# Altium footprint library WR-TBL_Pluggable Connector_3.50mm.PcbLib: 175 footprints (part 7 of 11)
Each footprint in its own frame and in the unit in brackets; x right, y up, seen from the top. Pads: shape width x height; smd on the part's side, far side on the other; paste and mask are expansions set on the pad; w line width, h text height; cw(c..) or ccw(c..) is an arc to the next point about the centre after c.
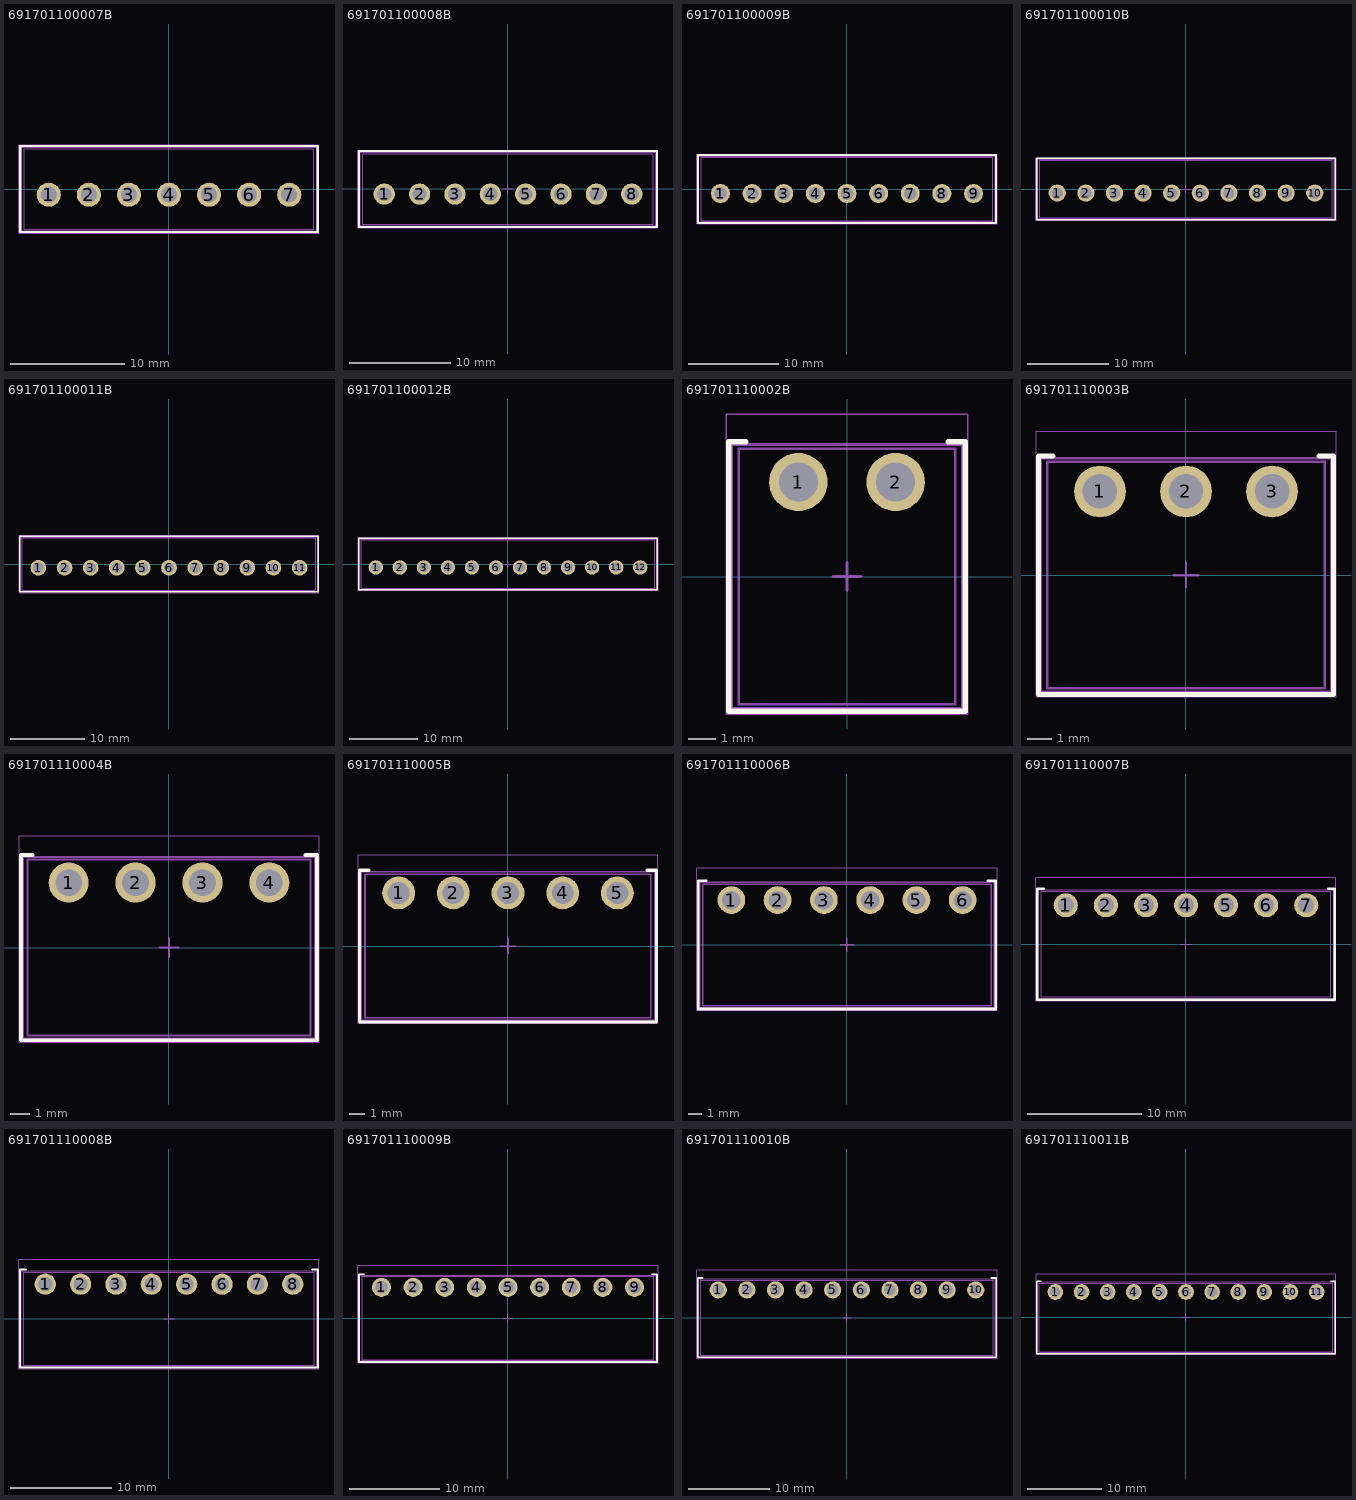
[diagram p6: the footprints below, top view; thin cyan lines are the x and y axes]

## 691701100007B [mm] "3.50 mm Vertical PCB Header THR type, 07p"
height 9.2
pads (7):
  round 2.1 hole 1.4: 1(-10.5,-0.5) 2(-7,-0.5) 3(-3.5,-0.5) 4(0,-0.5) 5(3.5,-0.5) 6(7,-0.5) 7(10.5,-0.5)
Top Overlay:
  lines w0.2: -13,-3.75 13,-3.75 13,3.75 -13,3.75 -13,-3.75
Top Paste:
  region: 5.05,1.75 5.05,-2.75 1.95,-2.75 1.95,1.75
  region: 1.55,1.75 1.55,-2.75 -1.55,-2.75 -1.55,1.75
  region: -1.95,1.75 -1.95,-2.75 -5.05,-2.75 -5.05,1.75
  region: -5.45,1.75 -5.45,-2.75 -8.55,-2.75 -8.55,1.75
  region: -8.95,1.75 -8.95,-2.75 -12.05,-2.75 -12.05,1.75
  region: 8.55,1.75 8.55,-2.75 5.45,-2.75 5.45,1.75
  region: 12.05,1.75 12.05,-2.75 8.95,-2.75 8.95,1.75
Assembly Notes:
  text "Stencil thickness : 120 μm" at -5.156,-4.601 h1
Top Assembly:
  lines w0.1: -12.9,-3.65 12.9,-3.65 12.9,3.65 -12.9,3.65 -12.9,-3.65
Top Designator:
  text ".Designator" at -3.647,-0.357 h1
Top 3D Body:
  lines w0.1: -12.65,-3.5 12.65,-3.5 12.65,3.5 -12.65,3.5 -12.65,-3.5
Top Courtyard:
  lines w0.05: -13.1,-3.85 -13.1,3.85 13.1,3.85 13.1,-3.85 -13.1,-3.85
Top Component Center:
  lines w0.1: -0.5,0 0.5,0 ; 0,-0.5 0,0.5
3D body "691701100007B.stp": height 9.25, standoff -2.55, extent -12.85,-3.5 12.85,3.5

## 691701100008B [mm] "3.50 mm Vertical PCB Header THR type, 08p"
height 9.2
pads (8):
  round 2.1 hole 1.4: 1(-12.25,-0.5) 2(-8.75,-0.5) 3(-5.25,-0.5) 4(-1.75,-0.5) 5(1.75,-0.5) 6(5.25,-0.5) 7(8.75,-0.5) 8(12.25,-0.5)
Top Overlay:
  lines w0.2: -14.75,-3.75 14.75,-3.75 14.75,3.75 -14.75,3.75 -14.75,-3.75
Top Paste:
  region: 13.8,1.75 13.8,-2.75 10.7,-2.75 10.7,1.75
  region: 10.3,1.75 10.3,-2.75 7.2,-2.75 7.2,1.75
  region: 6.8,1.75 6.8,-2.75 3.7,-2.75 3.7,1.75
  region: -10.7,1.75 -10.7,-2.75 -13.8,-2.75 -13.8,1.75
  region: -7.2,1.75 -7.2,-2.75 -10.3,-2.75 -10.3,1.75
  region: -3.7,1.75 -3.7,-2.75 -6.8,-2.75 -6.8,1.75
  region: -0.2,1.75 -0.2,-2.75 -3.3,-2.75 -3.3,1.75
  region: 3.3,1.75 3.3,-2.75 0.2,-2.75 0.2,1.75
Assembly Notes:
  text "Stencil thickness : 120 μm" at -5.156,-4.601 h1
Top Assembly:
  lines w0.1: -14.65,-3.65 14.65,-3.65 14.65,3.65 -14.65,3.65 -14.65,-3.65
Top Designator:
  text ".Designator" at -3.647,-0.357 h1
Top 3D Body:
  lines w0.1: -14.4,-3.5 14.4,-3.5 14.4,3.5 -14.4,3.5 -14.4,-3.5
Top Courtyard:
  lines w0.05: -14.85,-3.85 -14.85,3.85 14.85,3.85 14.85,-3.85 -14.85,-3.85
Top Component Center:
  lines w0.1: -0.5,0 0.5,0 ; 0,-0.5 0,0.5
3D body "691701100008B.stp": height 9.25, standoff -2.55, extent -14.6,-3.5 14.6,3.5

## 691701100009B [mm] "3.50 mm Vertical PCB Header THR type, 09p"
height 9.2
pads (9):
  round 2.1 hole 1.4: 1(-14,-0.5) 2(-10.5,-0.5) 3(-7,-0.5) 4(-3.5,-0.5) 5(0,-0.5) 6(3.5,-0.5) 7(7,-0.5) 8(10.5,-0.5) 9(14,-0.5)
Top Overlay:
  lines w0.2: -16.5,-3.75 16.5,-3.75 16.5,3.75 -16.5,3.75 -16.5,-3.75
Top Paste:
  region: 15.55,1.75 15.55,-2.75 12.45,-2.75 12.45,1.75
  region: 12.05,1.75 12.05,-2.75 8.95,-2.75 8.95,1.75
  region: 8.55,1.75 8.55,-2.75 5.45,-2.75 5.45,1.75
  region: 5.05,1.75 5.05,-2.75 1.95,-2.75 1.95,1.75
  region: -12.45,1.75 -12.45,-2.75 -15.55,-2.75 -15.55,1.75
  region: -8.95,1.75 -8.95,-2.75 -12.05,-2.75 -12.05,1.75
  region: -5.45,1.75 -5.45,-2.75 -8.55,-2.75 -8.55,1.75
  region: -1.95,1.75 -1.95,-2.75 -5.05,-2.75 -5.05,1.75
  region: 1.55,1.75 1.55,-2.75 -1.55,-2.75 -1.55,1.75
Assembly Notes:
  text "Stencil thickness : 120 μm" at -5.156,-4.601 h1
Top Assembly:
  lines w0.1: -16.4,-3.65 16.4,-3.65 16.4,3.65 -16.4,3.65 -16.4,-3.65
Top Designator:
  text ".Designator" at -3.647,-0.357 h1
Top 3D Body:
  lines w0.1: -16.15,-3.5 -16.15,3.5 16.15,3.5 16.15,-3.5 -16.15,-3.5
Top Courtyard:
  lines w0.05: -16.6,-3.85 -16.6,3.85 16.6,3.85 16.6,-3.85 -16.6,-3.85
Top Component Center:
  lines w0.1: -0.5,0 0.5,0 ; 0,-0.5 0,0.5
3D body "691701100009B.stp": height 9.25, standoff -2.55, extent -16.35,-3.5 16.35,3.5

## 691701100010B [mm] "3.50 mm Vertical PCB Header THR type, 10p"
height 9.2
pads (10):
  round 2.1 hole 1.4: 1(-15.75,-0.5) 2(-12.25,-0.5) 3(-8.75,-0.5) 4(-5.25,-0.5) 5(-1.75,-0.5) 6(1.75,-0.5) 7(5.25,-0.5) 8(8.75,-0.5) 9(12.25,-0.5) 10(15.75,-0.5)
Top Overlay:
  lines w0.2: -18.25,-3.75 -18.25,3.75 18.25,3.75 18.25,-3.75 -18.25,-3.75
Top Paste:
  region: 13.8,1.75 13.8,-2.75 10.7,-2.75 10.7,1.75
  region: 10.3,1.75 10.3,-2.75 7.2,-2.75 7.2,1.75
  region: 6.8,1.75 6.8,-2.75 3.7,-2.75 3.7,1.75
  region: 3.3,1.75 3.3,-2.75 0.2,-2.75 0.2,1.75
  region: -14.2,1.75 -14.2,-2.75 -17.3,-2.75 -17.3,1.75
  region: -10.7,1.75 -10.7,-2.75 -13.8,-2.75 -13.8,1.75
  region: -7.2,1.75 -7.2,-2.75 -10.3,-2.75 -10.3,1.75
  region: -3.7,1.75 -3.7,-2.75 -6.8,-2.75 -6.8,1.75
  region: -0.2,1.75 -0.2,-2.75 -3.3,-2.75 -3.3,1.75
  region: 17.3,1.75 17.3,-2.75 14.2,-2.75 14.2,1.75
Assembly Notes:
  text "Stencil thickness : 120 μm" at -5.156,-4.601 h1
Top Assembly:
  lines w0.1: -18.15,-3.65 -18.15,3.65 18.15,3.65 18.15,-3.65 -18.15,-3.65
Top Designator:
  text ".Designator" at -3.647,-0.357 h1
Top 3D Body:
  lines w0.1: -17.9,-3.5 17.9,-3.5 17.9,3.5 -17.9,3.5 -17.9,-3.5
Top Courtyard:
  lines w0.05: -18.35,-3.85 18.35,-3.85 18.35,3.85 -18.35,3.85 -18.35,-3.85
Top Component Center:
  lines w0.1: -0.5,0 0.5,0 ; 0,-0.5 0,0.5
3D body "691701100010B.stp": height 9.25, standoff -2.55, extent -18.1,-3.5 18.1,3.5

## 691701100011B [mm] "3.50 mm Vertical PCB Header THR type, 11p"
height 9.2
pads (11):
  round 2.1 hole 1.4: 1(-17.5,-0.5) 2(-14,-0.5) 3(-10.5,-0.5) 4(-7,-0.5) 5(-3.5,-0.5) 6(0,-0.5) 7(3.5,-0.5) 8(7,-0.5) 9(10.5,-0.5) 10(14,-0.5) 11(17.5,-0.5)
Top Overlay:
  lines w0.2: -20,-3.75 20,-3.75 20,3.75 -20,3.75 -20,-3.75
Top Paste:
  region: 15.55,1.75 15.55,-2.75 12.45,-2.75 12.45,1.75
  region: -1.95,1.75 -1.95,-2.75 -5.05,-2.75 -5.05,1.75
  region: -5.45,1.75 -5.45,-2.75 -8.55,-2.75 -8.55,1.75
  region: -8.95,1.75 -8.95,-2.75 -12.05,-2.75 -12.05,1.75
  region: -12.45,1.75 -12.45,-2.75 -15.55,-2.75 -15.55,1.75
  region: -15.95,1.75 -15.95,-2.75 -19.05,-2.75 -19.05,1.75
  region: 1.55,1.75 1.55,-2.75 -1.55,-2.75 -1.55,1.75
  region: 5.05,1.75 5.05,-2.75 1.95,-2.75 1.95,1.75
  region: 8.55,1.75 8.55,-2.75 5.45,-2.75 5.45,1.75
  region: 12.05,1.75 12.05,-2.75 8.95,-2.75 8.95,1.75
  region: 19.05,1.75 19.05,-2.75 15.95,-2.75 15.95,1.75
Assembly Notes:
  text "Stencil thickness : 120 μm" at -5.156,-4.601 h1
Top Assembly:
  lines w0.1: -19.9,-3.65 19.9,-3.65 19.9,3.65 -19.9,3.65 -19.9,-3.65
Top Designator:
  text ".Designator" at -3.647,-0.357 h1
Top 3D Body:
  lines w0.1: -19.65,-3.5 -19.65,3.5 19.65,3.5 19.65,-3.5 -19.65,-3.5
Top Courtyard:
  lines w0.05: -20.1,-3.85 -20.1,3.85 20.1,3.85 20.1,-3.85 -20.1,-3.85
Top Component Center:
  lines w0.1: -0.5,0 0.5,0 ; 0,-0.5 0,0.5
3D body "691701100011B.stp": height 9.25, standoff -2.55, extent -19.85,-3.5 19.85,3.5

## 691701100012B [mm] "3.50 mm Vertical PCB Header THR type, 12p"
height 9.2
pads (12):
  round 2.1 hole 1.4: 1(-19.25,-0.5) 2(-15.75,-0.5) 3(-12.25,-0.5) 4(-8.75,-0.5) 5(-5.25,-0.5) 6(-1.75,-0.5) 7(1.75,-0.5) 8(5.25,-0.5) 9(8.75,-0.5) 10(12.25,-0.5) 11(15.75,-0.5) 12(19.25,-0.5)
Top Overlay:
  lines w0.2: -21.75,-3.75 21.75,-3.75 21.75,3.75 -21.75,3.75 -21.75,-3.75
Top Paste:
  region: 20.8,1.75 20.8,-2.75 17.7,-2.75 17.7,1.75
  region: 17.3,1.75 17.3,-2.75 14.2,-2.75 14.2,1.75
  region: 10.3,1.75 10.3,-2.75 7.2,-2.75 7.2,1.75
  region: 6.8,1.75 6.8,-2.75 3.7,-2.75 3.7,1.75
  region: 3.3,1.75 3.3,-2.75 0.2,-2.75 0.2,1.75
  region: -0.2,1.75 -0.2,-2.75 -3.3,-2.75 -3.3,1.75
  region: -17.7,1.75 -17.7,-2.75 -20.8,-2.75 -20.8,1.75
  region: -14.2,1.75 -14.2,-2.75 -17.3,-2.75 -17.3,1.75
  region: -10.7,1.75 -10.7,-2.75 -13.8,-2.75 -13.8,1.75
  region: -7.2,1.75 -7.2,-2.75 -10.3,-2.75 -10.3,1.75
  region: -3.7,1.75 -3.7,-2.75 -6.8,-2.75 -6.8,1.75
  region: 13.8,1.75 13.8,-2.75 10.7,-2.75 10.7,1.75
Assembly Notes:
  text "Stencil thickness : 120 μm" at -5.156,-4.601 h1
Top Assembly:
  lines w0.1: -21.65,-3.65 21.65,-3.65 21.65,3.65 -21.65,3.65 -21.65,-3.65
Top Designator:
  text ".Designator" at -3.647,-0.357 h1
Top 3D Body:
  lines w0.1: -21.4,-3.5 -21.4,3.5 21.4,3.5 21.4,-3.5 -21.4,-3.5
Top Courtyard:
  lines w0.05: -21.85,-3.85 -21.85,3.85 21.85,3.85 21.85,-3.85 -21.85,-3.85
Top Component Center:
  lines w0.1: -0.5,0 0.5,0 ; 0,-0.5 0,0.5
3D body "691701100012B.stp": height 9.25, standoff -2.55, extent -21.6,-3.5 21.6,3.5

## 691701110002B [mm] "3.50 mm Horizontal PCB Header THR type, 02p"
height 7
pads (2):
  round 2.1 hole 1.4: 1(-1.75,3.4) 2(1.75,3.4)
Top Overlay:
  lines w0.2: -3.65,4.85 -4.25,4.85 -4.25,-4.85 4.25,-4.85 4.25,4.85 3.65,4.85
Top Paste:
  region: 0.2,5.65 3.3,5.65 3.3,1.15 0.2,1.15
  region: -3.3,5.65 -0.2,5.65 -0.2,1.15 -3.3,1.15
Assembly Notes:
  text "Stencil thickness : 120 μm" at -5.156,-5.651 h1
Top Assembly:
  lines w0.1: -4.15,-4.75 -4.15,4.75 4.15,4.75 4.15,-4.75 -4.15,-4.75
Top Designator:
  text ".Designator" at -3.647,-0.357 h1
Top 3D Body:
  lines w0.1: -3.9,-4.6 3.9,-4.6 3.9,4.6 -3.9,4.6 -3.9,-4.6
Top Courtyard:
  lines w0.05: -4.35,-4.95 4.35,-4.95 4.35,5.85 -4.35,5.85 -4.35,-4.95
Top Component Center:
  lines w0.1: -0.5,0 0.5,0 ; 0,-0.5 0,0.5
3D body "691701110002B.stp": height 7.05, standoff -2.55, extent -4.1,-4.6 4.1,4.6

## 691701110003B [mm] "3.50 mm Horizontal PCB Header THR type, 03p"
height 7
pads (3):
  round 2.1 hole 1.4: 1(-3.5,3.4) 2(0,3.4) 3(3.5,3.4)
Top Overlay:
  lines w0.2: -5.4,4.85 -6,4.85 -6,-4.85 6,-4.85 6,4.85 5.4,4.85
Top Paste:
  region: -1.55,5.65 1.55,5.65 1.55,1.15 -1.55,1.15
  region: -5.05,5.65 -1.95,5.65 -1.95,1.15 -5.05,1.15
  region: 1.95,5.65 5.05,5.65 5.05,1.15 1.95,1.15
Assembly Notes:
  text "Stencil thickness : 120 μm" at -5.156,-5.651 h1
Top Assembly:
  lines w0.1: -5.9,-4.75 5.9,-4.75 5.9,4.75 -5.9,4.75 -5.9,-4.75
Top Designator:
  text ".Designator" at -3.647,-0.357 h1
Top 3D Body:
  lines w0.1: -5.65,-4.6 -5.65,4.6 5.65,4.6 5.65,-4.6 -5.65,-4.6
Top Courtyard:
  lines w0.05: -6.1,-4.95 -6.1,5.85 6.1,5.85 6.1,-4.95 -6.1,-4.95
Top Component Center:
  lines w0.1: -0.5,0 0.5,0 ; 0,-0.5 0,0.5
3D body "691701110003B.stp": height 7.05, standoff -2.55, extent -5.85,-4.6 5.85,4.6

## 691701110004B [mm] "3.50 mm Horizontal PCB Header THR type, 04p"
height 7
pads (4):
  round 2.1 hole 1.4: 1(-5.25,3.4) 2(-1.75,3.4) 3(1.75,3.4) 4(5.25,3.4)
Top Overlay:
  lines w0.2: -7.15,4.85 -7.75,4.85 -7.75,-4.85 7.75,-4.85 7.75,4.85 7.15,4.85
Top Paste:
  region: 0.2,5.65 3.3,5.65 3.3,1.15 0.2,1.15
  region: -6.8,5.65 -3.7,5.65 -3.7,1.15 -6.8,1.15
  region: -3.3,5.65 -0.2,5.65 -0.2,1.15 -3.3,1.15
  region: 3.7,5.65 6.8,5.65 6.8,1.15 3.7,1.15
Assembly Notes:
  text "Stencil thickness : 120 μm" at -5.156,-5.651 h1
Top Assembly:
  lines w0.1: -7.65,-4.75 7.65,-4.75 7.65,4.75 -7.65,4.75 -7.65,-4.75
Top Designator:
  text ".Designator" at -3.647,-0.357 h1
Top 3D Body:
  lines w0.1: -7.4,-4.6 -7.4,4.6 7.4,4.6 7.4,-4.6 -7.4,-4.6
Top Courtyard:
  lines w0.05: -7.85,-4.95 -7.85,5.85 7.85,5.85 7.85,-4.95 -7.85,-4.95
Top Component Center:
  lines w0.1: -0.5,0 0.5,0 ; 0,-0.5 0,0.5
3D body "691701110004B.stp": height 7.05, standoff -2.55, extent -7.6,-4.6 7.6,4.6

## 691701110005B [mm] "3.50 mm Horizontal PCB Header THR type, 05p"
height 7
pads (5):
  round 2.1 hole 1.4: 1(-7,3.4) 2(-3.5,3.4) 3(0,3.4) 4(3.5,3.4) 5(7,3.4)
Top Overlay:
  lines w0.2: -8.9,4.85 -9.5,4.85 -9.5,-4.85 9.5,-4.85 9.5,4.85 8.9,4.85
Top Paste:
  region: 5.45,5.65 8.55,5.65 8.55,1.15 5.45,1.15
  region: 1.95,5.65 5.05,5.65 5.05,1.15 1.95,1.15
  region: -5.05,5.65 -1.95,5.65 -1.95,1.15 -5.05,1.15
  region: -8.55,5.65 -5.45,5.65 -5.45,1.15 -8.55,1.15
  region: -1.55,5.65 1.55,5.65 1.55,1.15 -1.55,1.15
Assembly Notes:
  text "Stencil thickness : 120 μm" at -5.156,-5.651 h1
Top Assembly:
  lines w0.1: -9.4,-4.75 9.4,-4.75 9.4,4.75 -9.4,4.75 -9.4,-4.75
Top Designator:
  text ".Designator" at -3.647,-0.357 h1
Top 3D Body:
  lines w0.1: -9.15,-4.6 -9.15,4.6 9.15,4.6 9.15,-4.6 -9.15,-4.6
Top Courtyard:
  lines w0.05: -9.6,-4.95 -9.6,5.85 9.6,5.85 9.6,-4.95 -9.6,-4.95
Top Component Center:
  lines w0.1: -0.5,0 0.5,0 ; 0,-0.5 0,0.5
3D body "691701110005B.stp": height 7.05, standoff -2.55, extent -9.35,-4.6 9.35,4.6

## 691701110006B [mm] "3.50 mm Horizontal PCB Header THR type, 06p"
height 7
pads (6):
  round 2.1 hole 1.4: 1(-8.75,3.4) 2(-5.25,3.4) 3(-1.75,3.4) 4(1.75,3.4) 5(5.25,3.4) 6(8.75,3.4)
Top Overlay:
  lines w0.2: -10.65,4.85 -11.25,4.85 -11.25,-4.85 11.25,-4.85 11.25,4.85 10.65,4.85
Top Paste:
  region: -3.3,5.65 -0.2,5.65 -0.2,1.15 -3.3,1.15
  region: -10.3,5.65 -7.2,5.65 -7.2,1.15 -10.3,1.15
  region: -6.8,5.65 -3.7,5.65 -3.7,1.15 -6.8,1.15
  region: 0.2,5.65 3.3,5.65 3.3,1.15 0.2,1.15
  region: 3.7,5.65 6.8,5.65 6.8,1.15 3.7,1.15
  region: 7.2,5.65 10.3,5.65 10.3,1.15 7.2,1.15
Assembly Notes:
  text "Stencil thickness : 120 μm" at -5.156,-5.651 h1
Top Assembly:
  lines w0.1: -11.15,-4.75 11.15,-4.75 11.15,4.75 -11.15,4.75 -11.15,-4.75
Top Designator:
  text ".Designator" at -3.647,-0.357 h1
Top 3D Body:
  lines w0.1: -10.9,-4.6 -10.9,4.6 10.9,4.6 10.9,-4.6 -10.9,-4.6
Top Courtyard:
  lines w0.05: -11.35,-4.95 -11.35,5.85 11.35,5.85 11.35,-4.95 -11.35,-4.95
Top Component Center:
  lines w0.1: -0.5,0 0.5,0 ; 0,-0.5 0,0.5
3D body "691701110006B.stp": height 7.05, standoff -2.55, extent -11.1,-4.6 11.1,4.6

## 691701110007B [mm] "3.50 mm Horizontal PCB Header THR type, 07p"
height 7
pads (7):
  round 2.1 hole 1.4: 1(-10.5,3.4) 2(-7,3.4) 3(-3.5,3.4) 4(0,3.4) 5(3.5,3.4) 6(7,3.4) 7(10.5,3.4)
Top Overlay:
  lines w0.2: -12.4,4.85 -13,4.85 -13,-4.85 13,-4.85 13,4.85 12.4,4.85
Top Paste:
  region: -5.05,5.65 -1.95,5.65 -1.95,1.15 -5.05,1.15
  region: -12.05,5.65 -8.95,5.65 -8.95,1.15 -12.05,1.15
  region: -8.55,5.65 -5.45,5.65 -5.45,1.15 -8.55,1.15
  region: -1.55,5.65 1.55,5.65 1.55,1.15 -1.55,1.15
  region: 1.95,5.65 5.05,5.65 5.05,1.15 1.95,1.15
  region: 5.45,5.65 8.55,5.65 8.55,1.15 5.45,1.15
  region: 8.95,5.65 12.05,5.65 12.05,1.15 8.95,1.15
Assembly Notes:
  text "Stencil thickness : 120 μm" at -5.156,-5.651 h1
Top Assembly:
  lines w0.1: -12.9,-4.75 -12.9,4.75 12.9,4.75 12.9,-4.75 -12.9,-4.75
Top Designator:
  text ".Designator" at -3.647,-0.357 h1
Top 3D Body:
  lines w0.1: -12.65,-4.6 12.65,-4.6 12.65,4.6 -12.65,4.6 -12.65,-4.6
Top Courtyard:
  lines w0.05: -13.1,-4.95 13.1,-4.95 13.1,5.85 -13.1,5.85 -13.1,-4.95
Top Component Center:
  lines w0.1: -0.5,0 0.5,0 ; 0,-0.5 0,0.5
3D body "691701110007B.stp": height 7.05, standoff -2.55, extent -12.85,-4.6 12.85,4.6

## 691701110008B [mm] "3.50 mm Horizontal PCB Header THR type, 08p"
height 7
pads (8):
  round 2.1 hole 1.4: 1(-12.25,3.4) 2(-8.75,3.4) 3(-5.25,3.4) 4(-1.75,3.4) 5(1.75,3.4) 6(5.25,3.4) 7(8.75,3.4) 8(12.25,3.4)
Top Overlay:
  lines w0.2: -14.15,4.85 -14.75,4.85 -14.75,-4.85 14.75,-4.85 14.75,4.85 14.15,4.85
Top Paste:
  region: -6.8,5.65 -3.7,5.65 -3.7,1.15 -6.8,1.15
  region: -13.8,5.65 -10.7,5.65 -10.7,1.15 -13.8,1.15
  region: -10.3,5.65 -7.2,5.65 -7.2,1.15 -10.3,1.15
  region: -3.3,5.65 -0.2,5.65 -0.2,1.15 -3.3,1.15
  region: 0.2,5.65 3.3,5.65 3.3,1.15 0.2,1.15
  region: 3.7,5.65 6.8,5.65 6.8,1.15 3.7,1.15
  region: 7.2,5.65 10.3,5.65 10.3,1.15 7.2,1.15
  region: 10.7,5.65 13.8,5.65 13.8,1.15 10.7,1.15
Assembly Notes:
  text "Stencil thickness : 120 μm" at -5.156,-5.651 h1
Top Assembly:
  lines w0.1: -14.65,-4.75 14.65,-4.75 14.65,4.75 -14.65,4.75 -14.65,-4.75
Top Designator:
  text ".Designator" at -3.647,-0.357 h1
Top 3D Body:
  lines w0.1: -14.4,-4.6 -14.4,4.6 14.4,4.6 14.4,-4.6 -14.4,-4.6
Top Courtyard:
  lines w0.05: -14.85,-4.95 -14.85,5.85 14.85,5.85 14.85,-4.95 -14.85,-4.95
Top Component Center:
  lines w0.1: -0.5,0 0.5,0 ; 0,-0.5 0,0.5
3D body "691701110008B.stp": height 7.05, standoff -2.55, extent -14.6,-4.6 14.6,4.6

## 691701110009B [mm] "3.50 mm Horizontal PCB Header THR type, 09p"
height 7
pads (9):
  round 2.1 hole 1.4: 1(-14,3.4) 2(-10.5,3.4) 3(-7,3.4) 4(-3.5,3.4) 5(0,3.4) 6(3.5,3.4) 7(7,3.4) 8(10.5,3.4) 9(14,3.4)
Top Overlay:
  lines w0.2: -15.9,4.85 -16.5,4.85 -16.5,-4.85 16.5,-4.85 16.5,4.85 15.9,4.85
Top Paste:
  region: 12.45,5.65 15.55,5.65 15.55,1.15 12.45,1.15
  region: 8.95,5.65 12.05,5.65 12.05,1.15 8.95,1.15
  region: 5.45,5.65 8.55,5.65 8.55,1.15 5.45,1.15
  region: 1.95,5.65 5.05,5.65 5.05,1.15 1.95,1.15
  region: -1.55,5.65 1.55,5.65 1.55,1.15 -1.55,1.15
  region: -5.05,5.65 -1.95,5.65 -1.95,1.15 -5.05,1.15
  region: -12.05,5.65 -8.95,5.65 -8.95,1.15 -12.05,1.15
  region: -15.55,5.65 -12.45,5.65 -12.45,1.15 -15.55,1.15
  region: -8.55,5.65 -5.45,5.65 -5.45,1.15 -8.55,1.15
Assembly Notes:
  text "Stencil thickness : 120 μm" at -5.156,-5.651 h1
Top Assembly:
  lines w0.1: -16.4,-4.75 16.4,-4.75 16.4,4.75 -16.4,4.75 -16.4,-4.75
Top Designator:
  text ".Designator" at -3.647,-0.357 h1
Top 3D Body:
  lines w0.1: -16.15,-4.6 -16.15,4.6 16.15,4.6 16.15,-4.6 -16.15,-4.6
Top Courtyard:
  lines w0.05: -16.6,-4.95 -16.6,5.85 16.6,5.85 16.6,-4.95 -16.6,-4.95
Top Component Center:
  lines w0.1: -0.5,0 0.5,0 ; 0,-0.5 0,0.5
3D body "691701110009B.stp": height 7.05, standoff -2.55, extent -16.35,-4.6 16.35,4.6

## 691701110010B [mm] "3.50 mm Horizontal PCB Header THR type, 10p"
height 7
pads (10):
  round 2.1 hole 1.4: 1(-15.75,3.4) 2(-12.25,3.4) 3(-8.75,3.4) 4(-5.25,3.4) 5(-1.75,3.4) 6(1.75,3.4) 7(5.25,3.4) 8(8.75,3.4) 9(12.25,3.4) 10(15.75,3.4)
Top Overlay:
  lines w0.2: -17.65,4.85 -18.25,4.85 -18.25,-4.85 18.25,-4.85 18.25,4.85 17.65,4.85
Top Paste:
  region: 14.2,5.65 17.3,5.65 17.3,1.15 14.2,1.15
  region: 10.7,5.65 13.8,5.65 13.8,1.15 10.7,1.15
  region: 7.2,5.65 10.3,5.65 10.3,1.15 7.2,1.15
  region: 3.7,5.65 6.8,5.65 6.8,1.15 3.7,1.15
  region: 0.2,5.65 3.3,5.65 3.3,1.15 0.2,1.15
  region: -3.3,5.65 -0.2,5.65 -0.2,1.15 -3.3,1.15
  region: -6.8,5.65 -3.7,5.65 -3.7,1.15 -6.8,1.15
  region: -13.8,5.65 -10.7,5.65 -10.7,1.15 -13.8,1.15
  region: -17.3,5.65 -14.2,5.65 -14.2,1.15 -17.3,1.15
  region: -10.3,5.65 -7.2,5.65 -7.2,1.15 -10.3,1.15
Assembly Notes:
  text "Stencil thickness : 120 μm" at -5.156,-5.651 h1
Top Assembly:
  lines w0.1: -18.15,-4.75 -18.15,4.75 18.15,4.75 18.15,-4.75 -18.15,-4.75
Top Designator:
  text ".Designator" at -3.647,-0.357 h1
Top 3D Body:
  lines w0.1: -17.9,-4.6 17.9,-4.6 17.9,4.6 -17.9,4.6 -17.9,-4.6
Top Courtyard:
  lines w0.05: -18.35,-4.95 18.35,-4.95 18.35,5.85 -18.35,5.85 -18.35,-4.95
Top Component Center:
  lines w0.1: -0.5,0 0.5,0 ; 0,-0.5 0,0.5
3D body "691701110010B.stp": height 7.05, standoff -2.55, extent -18.1,-4.6 18.1,4.6

## 691701110011B [mm] "3.50 mm Horizontal PCB Header THR type, 11p"
height 7
pads (11):
  round 2.1 hole 1.4: 1(-17.5,3.4) 2(-14,3.4) 3(-10.5,3.4) 4(-7,3.4) 5(-3.5,3.4) 6(0,3.4) 7(3.5,3.4) 8(7,3.4) 9(10.5,3.4) 10(14,3.4) 11(17.5,3.4)
Top Overlay:
  lines w0.2: -19.4,4.85 -20,4.85 -20,-4.85 20,-4.85 20,4.85 19.4,4.85
Top Paste:
  region: 15.95,5.65 19.05,5.65 19.05,1.15 15.95,1.15
  region: 12.45,5.65 15.55,5.65 15.55,1.15 12.45,1.15
  region: 8.95,5.65 12.05,5.65 12.05,1.15 8.95,1.15
  region: 5.45,5.65 8.55,5.65 8.55,1.15 5.45,1.15
  region: 1.95,5.65 5.05,5.65 5.05,1.15 1.95,1.15
  region: -1.55,5.65 1.55,5.65 1.55,1.15 -1.55,1.15
  region: -5.05,5.65 -1.95,5.65 -1.95,1.15 -5.05,1.15
  region: -8.55,5.65 -5.45,5.65 -5.45,1.15 -8.55,1.15
  region: -15.55,5.65 -12.45,5.65 -12.45,1.15 -15.55,1.15
  region: -19.05,5.65 -15.95,5.65 -15.95,1.15 -19.05,1.15
  region: -12.05,5.65 -8.95,5.65 -8.95,1.15 -12.05,1.15
Assembly Notes:
  text "Stencil thickness : 120 μm" at -5.156,-5.651 h1
Top Assembly:
  lines w0.1: -19.9,-4.75 19.9,-4.75 19.9,4.75 -19.9,4.75 -19.9,-4.75
Top Designator:
  text ".Designator" at -3.647,-0.357 h1
Top 3D Body:
  lines w0.1: -19.65,-4.6 -19.65,4.6 19.65,4.6 19.65,-4.6 -19.65,-4.6
Top Courtyard:
  lines w0.05: -20.1,-4.95 -20.1,5.85 20.1,5.85 20.1,-4.95 -20.1,-4.95
Top Component Center:
  lines w0.1: -0.5,0 0.5,0 ; 0,-0.5 0,0.5
3D body "691701110011B.stp": height 7.05, standoff -2.55, extent -19.85,-4.6 19.85,4.6